# Altium schematic symbol library DMP2240UDM-7.SchLib: 1 symbol
Pins are listed as number, name and electrical type; pins without a type are passive.

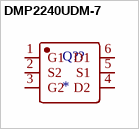
[diagram p0: symbol DMP2240UDM-7]

## DMP2240UDM-7
designator Q??
footprint SOT-26_L3.0-W1.6-P0.95-LS2.8-BL
pins: 1 G1, 2 S2, 3 G2, 4 D2, 5 S1, 6 D1